# Altium schematic symbol library SN74AUP1T34DCKR.SchLib: 1 symbol
Pins are listed as number, name and electrical type; pins without a type are passive.

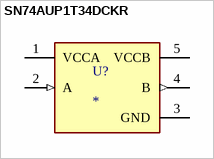
[diagram p0: symbol SN74AUP1T34DCKR]

## SN74AUP1T34DCKR
designator U?
1-Bit Unidirectional Voltage-Level Translator 5-SC70 -40 to 85; MP: SN74AUP1T34DCKR; Value: *; Availability: Unavailable; Package: None; Price: None
footprint SOT65P210X110-5N
pins: 1 VCCA (power), 2 A (in), 3 GND (power), 4 B (out), 5 VCCB (power)